# EAGLE library part 6N137S (library EMSinterface_V1.0)
MOTOROLA OPTO COUPLER
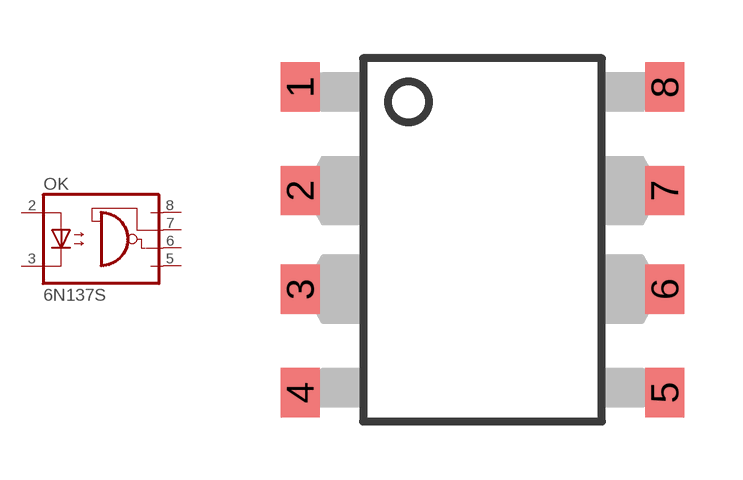
[diagram p3: symbol with the pads of SO8-GW300; footprint SO8-GW300]

Designator prefix OK

## 6N137SSMD  [SO8-GW300]
2  A  pas
3  C  pas
5  GND  pas
6  VO  pas
7  VE  pas
8  VCC  pas

## Footprint SO8-GW300 (pad centres in mm)
HCPL-772X Package witch Gull Wing Surface Mount Option 300 Source: HCPL7221.pdf
smd 1 x 1.27: 1 -4.69,3.937; 2 -4.69,1.27; 3 -4.69,-1.27; 4 -4.69,-3.937; 5 4.69,-3.937; 6 4.69,-1.27; 7 4.69,1.27; 8 4.69,3.937